# Altium schematic symbol library 2020-12-14_08-23-45.SchLib: 2 symbols
Pins are listed as number, name and electrical type; pins without a type are passive.

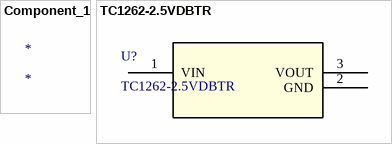
[diagram p0: symbols Component_1 to TC1262-2.5VDBTR]

## Component_1
designator *

## TC1262-2.5VDBTR
designator U?
No Description Available; Vendor: Microchip; Built_By: EMA_Jessica; SourceLibrary: Microchip_2019-08-23_5; Manufacturer_Part_Number: TC1262-2.5VDBTR; Copyright: Copyright (C) 2018 Accelerated Designs. All rights reserved; RefDes: RefDes; Type: DEV
footprint SOT-223_3MC_MCH
pins: 1 VIN, 2 GND, 3 VOUT